# Altium schematic symbol library WR-TBL_Pluggable Connector.SchLib: 879 symbols (part 13 of 15)
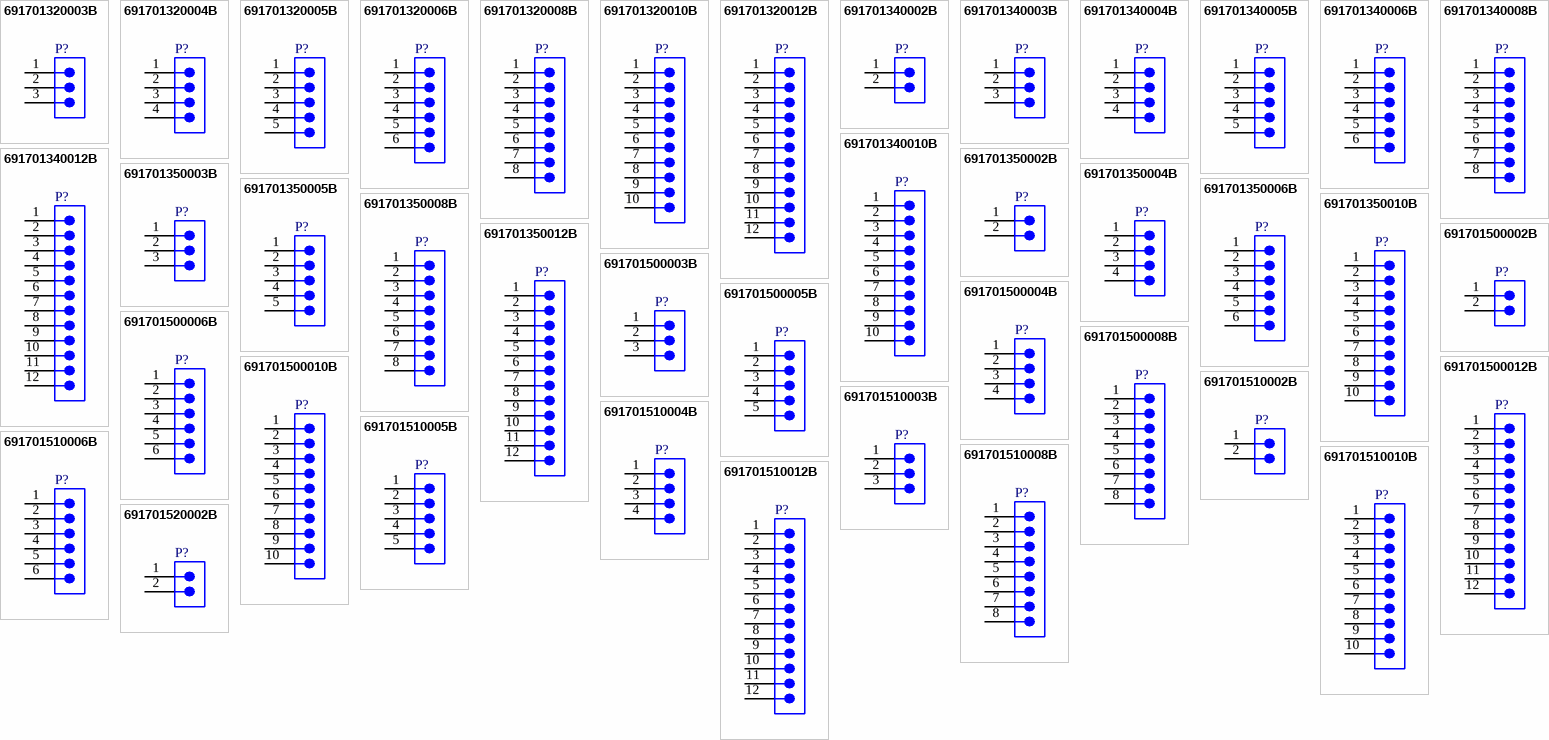
[diagram p33: symbols 691701320003B to 691701520002B]

## 691701500008B
designator P?  (value not drawn)
WR-TBL Series 7015B Open Vertical PCB Header, SMT, pitch 5.08mm, 08p; Manufacturer: Wurth Elektronik; Modularity: No; Rated Current: 10A; Working Voltage: 300V (AC); Manufacturer Part Number: 691701500008B; Product Series: WR-TBL; ComponentLink1Description: Website Link; ComponentLink1URL: https://www.we-online.com; ComponentLink2Description: Datasheet Link; ComponentLink2URL: https://www.we-online.com/components/products/datasheet/691701500008B; Mount: Surface Mount; Operating Temperature Min: -40degC; Operating Temperature Max: 130degC; Packaging: Box; Application: Pluggable; Number of Pins: 8; Number of Rows: 1; Orientation: Vertical; Lead Pitch: 5.08mm
footprint 691701500008B
pins: 1, 2, 3, 4, 5, 6, 7, 8

## 691701500010B
designator P?  (value not drawn)
WR-TBL Series 7015B Open Vertical PCB Header, SMT, pitch 5.08mm, 10p; Manufacturer: Wurth Elektronik; Modularity: No; Rated Current: 10A; Working Voltage: 300V (AC); Manufacturer Part Number: 691701500010B; Product Series: WR-TBL; ComponentLink1Description: Website Link; ComponentLink1URL: https://www.we-online.com; ComponentLink2Description: Datasheet Link; ComponentLink2URL: https://www.we-online.com/components/products/datasheet/691701500010B; Mount: Surface Mount; Operating Temperature Min: -40degC; Operating Temperature Max: 130degC; Packaging: Box; Application: Pluggable; Number of Pins: 10; Number of Rows: 1; Orientation: Vertical; Lead Pitch: 5.08mm
footprint 691701500010B
pins: 1, 2, 3, 4, 5, 6, 7, 8, 9, 10

## 691701500012B
designator P?  (value not drawn)
WR-TBL Series 7015B Open Vertical PCB Header, SMT, pitch 5.08mm, 12p; Manufacturer: Wurth Elektronik; Modularity: No; Rated Current: 10A; Working Voltage: 300V (AC); Manufacturer Part Number: 691701500012B; Product Series: WR-TBL; ComponentLink1Description: Website Link; ComponentLink1URL: https://www.we-online.com; ComponentLink2Description: Datasheet Link; ComponentLink2URL: https://www.we-online.com/components/products/datasheet/691701500012B; Mount: Surface Mount; Operating Temperature Min: -40degC; Operating Temperature Max: 130degC; Packaging: Box; Application: Pluggable; Number of Pins: 12; Number of Rows: 1; Orientation: Vertical; Lead Pitch: 5.08mm
footprint 691701500012B
pins: 1, 2, 3, 4, 5, 6, 7, 8, 9, 10, 11, 12

## 691701510002B
designator P?  (value not drawn)
WR-TBL Series 7015B Close Vertical PCB Header, SMT, pitch 5.08mm, 02p; Manufacturer: Wurth Elektronik; Modularity: No; Rated Current: 10A; Working Voltage: 300V (AC); Manufacturer Part Number: 691701510002B; Product Series: WR-TBL; ComponentLink1Description: Website Link; ComponentLink1URL: https://www.we-online.com; ComponentLink2Description: Datasheet Link; ComponentLink2URL: https://www.we-online.com/components/products/datasheet/691701510002B; Mount: Surface Mount; Operating Temperature Min: -40degC; Operating Temperature Max: 130degC; Packaging: Box; Application: Pluggable; Number of Pins: 2; Number of Rows: 1; Orientation: Vertical; Lead Pitch: 5.08mm
footprint 691701510002B
pins: 1, 2

## 691701510003B
designator P?  (value not drawn)
WR-TBL Series 7015B Close Vertical PCB Header, SMT, pitch 5.08mm, 03p; Manufacturer: Wurth Elektronik; Modularity: No; Rated Current: 10A; Working Voltage: 300V (AC); Manufacturer Part Number: 691701510003B; Product Series: WR-TBL; ComponentLink1Description: Website Link; ComponentLink1URL: https://www.we-online.com; ComponentLink2Description: Datasheet Link; ComponentLink2URL: https://www.we-online.com/components/products/datasheet/691701510003B; Mount: Surface Mount; Operating Temperature Min: -40degC; Operating Temperature Max: 130degC; Packaging: Box; Application: Pluggable; Number of Pins: 3; Number of Rows: 1; Orientation: Vertical; Lead Pitch: 5.08mm
footprint 691701510003B
pins: 1, 2, 3

## 691701510004B
designator P?  (value not drawn)
WR-TBL Series 7015B Close Vertical PCB Header, SMT, pitch 5.08mm, 04p; Manufacturer: Wurth Elektronik; Modularity: No; Rated Current: 10A; Working Voltage: 300V (AC); Manufacturer Part Number: 691701510004B; Product Series: WR-TBL; ComponentLink1Description: Website Link; ComponentLink1URL: https://www.we-online.com; ComponentLink2Description: Datasheet Link; ComponentLink2URL: https://www.we-online.com/components/products/datasheet/691701510004B; Mount: Surface Mount; Operating Temperature Min: -40degC; Operating Temperature Max: 130degC; Packaging: Box; Application: Pluggable; Number of Pins: 4; Number of Rows: 1; Orientation: Vertical; Lead Pitch: 5.08mm
footprint 691701510004B
pins: 1, 2, 3, 4

## 691701510005B
designator P?  (value not drawn)
WR-TBL Series 7015B Close Vertical PCB Header, SMT, pitch 5.08mm, 05p; Manufacturer: Wurth Elektronik; Modularity: No; Rated Current: 10A; Working Voltage: 300V (AC); Manufacturer Part Number: 691701510005B; Product Series: WR-TBL; ComponentLink1Description: Website Link; ComponentLink1URL: https://www.we-online.com; ComponentLink2Description: Datasheet Link; ComponentLink2URL: https://www.we-online.com/components/products/datasheet/691701510005B; Mount: Surface Mount; Operating Temperature Min: -40degC; Operating Temperature Max: 130degC; Packaging: Box; Application: Pluggable; Number of Pins: 5; Number of Rows: 1; Orientation: Vertical; Lead Pitch: 5.08mm
footprint 691701510005B
pins: 1, 2, 3, 4, 5

## 691701510006B
designator P?  (value not drawn)
WR-TBL Series 7015B Close Vertical PCB Header, SMT, pitch 5.08mm, 06p; Manufacturer: Wurth Elektronik; Modularity: No; Rated Current: 10A; Working Voltage: 300V (AC); Manufacturer Part Number: 691701510006B; Product Series: WR-TBL; ComponentLink1Description: Website Link; ComponentLink1URL: https://www.we-online.com; ComponentLink2Description: Datasheet Link; ComponentLink2URL: https://www.we-online.com/components/products/datasheet/691701510006B; Mount: Surface Mount; Operating Temperature Min: -40degC; Operating Temperature Max: 130degC; Packaging: Box; Application: Pluggable; Number of Pins: 6; Number of Rows: 1; Orientation: Vertical; Lead Pitch: 5.08mm
footprint 691701510006B
pins: 1, 2, 3, 4, 5, 6

## 691701510008B
designator P?  (value not drawn)
WR-TBL Series 7015B Close Vertical PCB Header, SMT, pitch 5.08mm, 08p; Manufacturer: Wurth Elektronik; Modularity: No; Rated Current: 10A; Working Voltage: 300V (AC); Manufacturer Part Number: 691701510008B; Product Series: WR-TBL; ComponentLink1Description: Website Link; ComponentLink1URL: https://www.we-online.com; ComponentLink2Description: Datasheet Link; ComponentLink2URL: https://www.we-online.com/components/products/datasheet/691701510008B; Mount: Surface Mount; Operating Temperature Min: -40degC; Operating Temperature Max: 130degC; Packaging: Box; Application: Pluggable; Number of Pins: 8; Number of Rows: 1; Orientation: Vertical; Lead Pitch: 5.08mm
footprint 691701510008B
pins: 1, 2, 3, 4, 5, 6, 7, 8

## 691701510010B
designator P?  (value not drawn)
WR-TBL Series 7015B Close Vertical PCB Header, SMT, pitch 5.08mm, 10p; Manufacturer: Wurth Elektronik; Modularity: No; Rated Current: 10A; Working Voltage: 300V (AC); Manufacturer Part Number: 691701510010B; Product Series: WR-TBL; ComponentLink1Description: Website Link; ComponentLink1URL: https://www.we-online.com; ComponentLink2Description: Datasheet Link; ComponentLink2URL: https://www.we-online.com/components/products/datasheet/691701510010B; Mount: Surface Mount; Operating Temperature Min: -40degC; Operating Temperature Max: 130degC; Packaging: Box; Application: Pluggable; Number of Pins: 10; Number of Rows: 1; Orientation: Vertical; Lead Pitch: 5.08mm
footprint 691701510010B
pins: 1, 2, 3, 4, 5, 6, 7, 8, 9, 10

## 691701510012B
designator P?  (value not drawn)
WR-TBL Series 7015B Close Vertical PCB Header, SMT, pitch 5.08mm, 12p; Manufacturer: Wurth Elektronik; Modularity: No; Rated Current: 10A; Working Voltage: 300V (AC); Manufacturer Part Number: 691701510012B; Product Series: WR-TBL; ComponentLink1Description: Website Link; ComponentLink1URL: https://www.we-online.com; ComponentLink2Description: Datasheet Link; ComponentLink2URL: https://www.we-online.com/components/products/datasheet/691701510012B; Mount: Surface Mount; Operating Temperature Min: -40degC; Operating Temperature Max: 130degC; Packaging: Box; Application: Pluggable; Number of Pins: 12; Number of Rows: 1; Orientation: Vertical; Lead Pitch: 5.08mm
footprint 691701510012B
pins: 1, 2, 3, 4, 5, 6, 7, 8, 9, 10, 11, 12

## 691701520002B
designator P?  (value not drawn)
WR-TBL Series 7015B Close Vertical PCB Header with Flanges, SMT, pitch 5.08mm, 02p; Manufacturer: Wurth Elektronik; Modularity: No; Rated Current: 10A; Working Voltage: 300V (AC); Manufacturer Part Number: 691701520002B; Product Series: WR-TBL; ComponentLink1Description: Website Link; ComponentLink1URL: https://www.we-online.com; ComponentLink2Description: Datasheet Link; ComponentLink2URL: https://www.we-online.com/components/products/datasheet/691701520002B; Mount: Surface Mount; Operating Temperature Min: -40degC; Operating Temperature Max: 130degC; Packaging: Box; Application: Pluggable; Number of Pins: 2; Number of Rows: 1; Orientation: Vertical; Lead Pitch: 5.08mm
footprint 691701520002B
pins: 1, 2

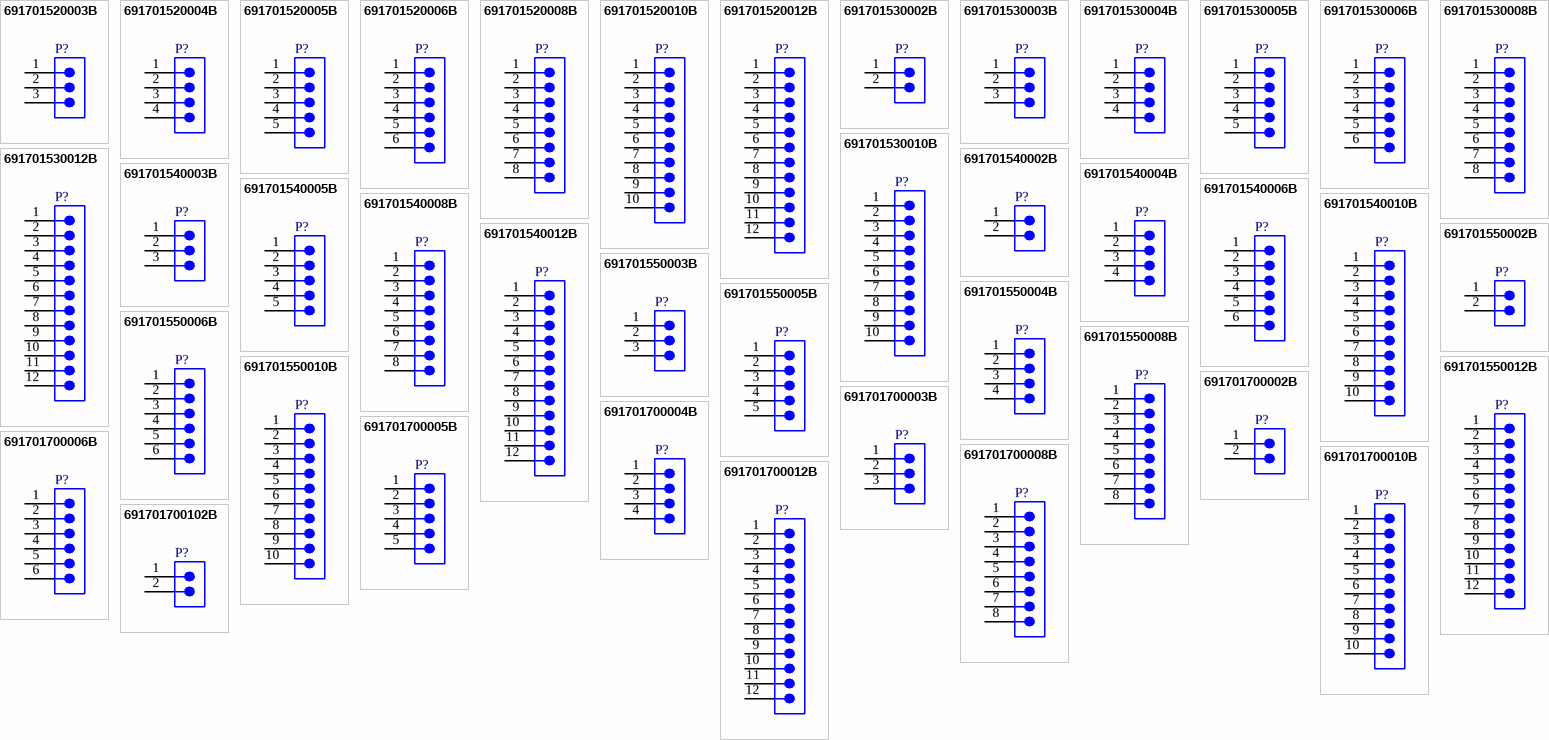
[diagram p19: symbols 691701520003B to 691701700102B]

## 691701520003B
designator P?  (value not drawn)
WR-TBL Series 7015B Close Vertical PCB Header with Flanges, SMT, pitch 5.08mm, 03p; Manufacturer: Wurth Elektronik; Modularity: No; Rated Current: 10A; Working Voltage: 300V (AC); Manufacturer Part Number: 691701520003B; Product Series: WR-TBL; ComponentLink1Description: Website Link; ComponentLink1URL: https://www.we-online.com; ComponentLink2Description: Datasheet Link; ComponentLink2URL: https://www.we-online.com/components/products/datasheet/691701520003B; Mount: Surface Mount; Operating Temperature Min: -40degC; Operating Temperature Max: 130degC; Packaging: Box; Application: Pluggable; Number of Pins: 3; Number of Rows: 1; Orientation: Vertical; Lead Pitch: 5.08mm
footprint 691701520003B
pins: 1, 2, 3

## 691701520004B
designator P?  (value not drawn)
WR-TBL Series 7015B Close Vertical PCB Header with Flanges, SMT, pitch 5.08mm, 04p; Manufacturer: Wurth Elektronik; Modularity: No; Rated Current: 10A; Working Voltage: 300V (AC); Manufacturer Part Number: 691701520004B; Product Series: WR-TBL; ComponentLink1Description: Website Link; ComponentLink1URL: https://www.we-online.com; ComponentLink2Description: Datasheet Link; ComponentLink2URL: https://www.we-online.com/components/products/datasheet/691701520004B; Mount: Surface Mount; Operating Temperature Min: -40degC; Operating Temperature Max: 130degC; Packaging: Box; Application: Pluggable; Number of Pins: 4; Number of Rows: 1; Orientation: Vertical; Lead Pitch: 5.08mm
footprint 691701520004B
pins: 1, 2, 3, 4

## 691701520005B
designator P?  (value not drawn)
WR-TBL Series 7015B Close Vertical PCB Header with Flanges, SMT, pitch 5.08mm, 05p; Manufacturer: Wurth Elektronik; Modularity: No; Rated Current: 10A; Working Voltage: 300V (AC); Manufacturer Part Number: 691701520005B; Product Series: WR-TBL; ComponentLink1Description: Website Link; ComponentLink1URL: https://www.we-online.com; ComponentLink2Description: Datasheet Link; ComponentLink2URL: https://www.we-online.com/components/products/datasheet/691701520005B; Mount: Surface Mount; Operating Temperature Min: -40degC; Operating Temperature Max: 130degC; Packaging: Box; Application: Pluggable; Number of Pins: 5; Number of Rows: 1; Orientation: Vertical; Lead Pitch: 5.08mm
footprint 691701520005B
pins: 1, 2, 3, 4, 5

## 691701520006B
designator P?  (value not drawn)
WR-TBL Series 7015B Close Vertical PCB Header with Flanges, SMT, pitch 5.08mm, 06p; Manufacturer: Wurth Elektronik; Modularity: No; Rated Current: 10A; Working Voltage: 300V (AC); Manufacturer Part Number: 691701520006B; Product Series: WR-TBL; ComponentLink1Description: Website Link; ComponentLink1URL: https://www.we-online.com; ComponentLink2Description: Datasheet Link; ComponentLink2URL: https://www.we-online.com/components/products/datasheet/691701520006B; Mount: Surface Mount; Operating Temperature Min: -40degC; Operating Temperature Max: 130degC; Packaging: Box; Application: Pluggable; Number of Pins: 6; Number of Rows: 1; Orientation: Vertical; Lead Pitch: 5.08mm
footprint 691701520006B
pins: 1, 2, 3, 4, 5, 6

## 691701520008B
designator P?  (value not drawn)
WR-TBL Series 7015B Close Vertical PCB Header with Flanges, SMT, pitch 5.08mm, 08p; Manufacturer: Wurth Elektronik; Modularity: No; Rated Current: 10A; Working Voltage: 300V (AC); Manufacturer Part Number: 691701520008B; Product Series: WR-TBL; ComponentLink1Description: Website Link; ComponentLink1URL: https://www.we-online.com; ComponentLink2Description: Datasheet Link; ComponentLink2URL: https://www.we-online.com/components/products/datasheet/691701520008B; Mount: Surface Mount; Operating Temperature Min: -40degC; Operating Temperature Max: 130degC; Packaging: Box; Application: Pluggable; Number of Pins: 8; Number of Rows: 1; Orientation: Vertical; Lead Pitch: 5.08mm
footprint 691701520008B
pins: 1, 2, 3, 4, 5, 6, 7, 8

## 691701520010B
designator P?  (value not drawn)
WR-TBL Series 7015B Close Vertical PCB Header with Flanges, SMT, pitch 5.08mm, 10p; Manufacturer: Wurth Elektronik; Modularity: No; Rated Current: 10A; Working Voltage: 300V (AC); Manufacturer Part Number: 691701520010B; Product Series: WR-TBL; ComponentLink1Description: Website Link; ComponentLink1URL: https://www.we-online.com; ComponentLink2Description: Datasheet Link; ComponentLink2URL: https://www.we-online.com/components/products/datasheet/691701520010B; Mount: Surface Mount; Operating Temperature Min: -40degC; Operating Temperature Max: 130degC; Packaging: Box; Application: Pluggable; Number of Pins: 10; Number of Rows: 1; Orientation: Vertical; Lead Pitch: 5.08mm
footprint 691701520010B
pins: 1, 2, 3, 4, 5, 6, 7, 8, 9, 10

## 691701520012B
designator P?  (value not drawn)
WR-TBL Series 7015B Close Vertical PCB Header with Flanges, SMT, pitch 5.08mm, 12p; Manufacturer: Wurth Elektronik; Modularity: No; Rated Current: 10A; Working Voltage: 300V (AC); Manufacturer Part Number: 691701520012B; Product Series: WR-TBL; ComponentLink1Description: Website Link; ComponentLink1URL: https://www.we-online.com; ComponentLink2Description: Datasheet Link; ComponentLink2URL: https://www.we-online.com/components/products/datasheet/691701520012B; Mount: Surface Mount; Operating Temperature Min: -40degC; Operating Temperature Max: 130degC; Packaging: Box; Application: Pluggable; Number of Pins: 12; Number of Rows: 1; Orientation: Vertical; Lead Pitch: 5.08mm
footprint 691701520012B
pins: 1, 2, 3, 4, 5, 6, 7, 8, 9, 10, 11, 12

## 691701530002B
designator P?  (value not drawn)
WR-TBL Series 7015B Open Horizontal PCB Header, SMT, pitch 5.08mm, 02p; Manufacturer: Wurth Elektronik; Modularity: No; Rated Current: 10A; Working Voltage: 300V (AC); Manufacturer Part Number: 691701530002B; Product Series: WR-TBL; ComponentLink1Description: Website Link; ComponentLink1URL: https://www.we-online.com; ComponentLink2Description: Datasheet Link; ComponentLink2URL: https://www.we-online.com/components/products/datasheet/691701530002B; Mount: Surface Mount; Operating Temperature Min: -40degC; Operating Temperature Max: 130degC; Packaging: Box; Application: Pluggable; Number of Pins: 2; Number of Rows: 1; Orientation: Horizontal; Lead Pitch: 5.08mm
footprint 691701530002B
pins: 1, 2

## 691701530003B
designator P?  (value not drawn)
WR-TBL Series 7015B Open Horizontal PCB Header, SMT, pitch 5.08mm, 03p; Manufacturer: Wurth Elektronik; Modularity: No; Rated Current: 10A; Working Voltage: 300V (AC); Manufacturer Part Number: 691701530003B; Product Series: WR-TBL; ComponentLink1Description: Website Link; ComponentLink1URL: https://www.we-online.com; ComponentLink2Description: Datasheet Link; ComponentLink2URL: https://www.we-online.com/components/products/datasheet/691701530003B; Mount: Surface Mount; Operating Temperature Min: -40degC; Operating Temperature Max: 130degC; Packaging: Box; Application: Pluggable; Number of Pins: 3; Number of Rows: 1; Orientation: Horizontal; Lead Pitch: 5.08mm
footprint 691701530003B
pins: 1, 2, 3

## 691701530004B
designator P?  (value not drawn)
WR-TBL Series 7015B Open Horizontal PCB Header, SMT, pitch 5.08mm, 04p; Manufacturer: Wurth Elektronik; Modularity: No; Rated Current: 10A; Working Voltage: 300V (AC); Manufacturer Part Number: 691701530004B; Product Series: WR-TBL; ComponentLink1Description: Website Link; ComponentLink1URL: https://www.we-online.com; ComponentLink2Description: Datasheet Link; ComponentLink2URL: https://www.we-online.com/components/products/datasheet/691701530004B; Mount: Surface Mount; Operating Temperature Min: -40degC; Operating Temperature Max: 130degC; Packaging: Box; Application: Pluggable; Number of Pins: 4; Number of Rows: 1; Orientation: Horizontal; Lead Pitch: 5.08mm
footprint 691701530004B
pins: 1, 2, 3, 4

## 691701530005B
designator P?  (value not drawn)
WR-TBL Series 7015B Open Horizontal PCB Header, SMT, pitch 5.08mm, 05p; Manufacturer: Wurth Elektronik; Modularity: No; Rated Current: 10A; Working Voltage: 300V (AC); Manufacturer Part Number: 691701530005B; Product Series: WR-TBL; ComponentLink1Description: Website Link; ComponentLink1URL: https://www.we-online.com; ComponentLink2Description: Datasheet Link; ComponentLink2URL: https://www.we-online.com/components/products/datasheet/691701530005B; Mount: Surface Mount; Operating Temperature Min: -40degC; Operating Temperature Max: 130degC; Packaging: Box; Application: Pluggable; Number of Pins: 5; Number of Rows: 1; Orientation: Horizontal; Lead Pitch: 5.08mm
footprint 691701530005B
pins: 1, 2, 3, 4, 5

## 691701530006B
designator P?  (value not drawn)
WR-TBL Series 7015B Open Horizontal PCB Header, SMT, pitch 5.08mm, 06p; Manufacturer: Wurth Elektronik; Modularity: No; Rated Current: 10A; Working Voltage: 300V (AC); Manufacturer Part Number: 691701530006B; Product Series: WR-TBL; ComponentLink1Description: Website Link; ComponentLink1URL: https://www.we-online.com; ComponentLink2Description: Datasheet Link; ComponentLink2URL: https://www.we-online.com/components/products/datasheet/691701530006B; Mount: Surface Mount; Operating Temperature Min: -40degC; Operating Temperature Max: 130degC; Packaging: Box; Application: Pluggable; Number of Pins: 6; Number of Rows: 1; Orientation: Horizontal; Lead Pitch: 5.08mm
footprint 691701530006B
pins: 1, 2, 3, 4, 5, 6

## 691701530008B
designator P?  (value not drawn)
WR-TBL Series 7015B Open Horizontal PCB Header, SMT, pitch 5.08mm, 08p; Manufacturer: Wurth Elektronik; Modularity: No; Rated Current: 10A; Working Voltage: 300V (AC); Manufacturer Part Number: 691701530008B; Product Series: WR-TBL; ComponentLink1Description: Website Link; ComponentLink1URL: https://www.we-online.com; ComponentLink2Description: Datasheet Link; ComponentLink2URL: https://www.we-online.com/components/products/datasheet/691701530008B; Mount: Surface Mount; Operating Temperature Min: -40degC; Operating Temperature Max: 130degC; Packaging: Box; Application: Pluggable; Number of Pins: 8; Number of Rows: 1; Orientation: Horizontal; Lead Pitch: 5.08mm
footprint 691701530008B
pins: 1, 2, 3, 4, 5, 6, 7, 8

## 691701530010B
designator P?  (value not drawn)
WR-TBL Series 7015B Open Horizontal PCB Header, SMT, pitch 5.08mm, 10p; Manufacturer: Wurth Elektronik; Modularity: No; Rated Current: 10A; Working Voltage: 300V (AC); Manufacturer Part Number: 691701530010B; Product Series: WR-TBL; ComponentLink1Description: Website Link; ComponentLink1URL: https://www.we-online.com; ComponentLink2Description: Datasheet Link; ComponentLink2URL: https://www.we-online.com/components/products/datasheet/691701530010B; Mount: Surface Mount; Operating Temperature Min: -40degC; Operating Temperature Max: 130degC; Packaging: Box; Application: Pluggable; Number of Pins: 10; Number of Rows: 1; Orientation: Horizontal; Lead Pitch: 5.08mm
footprint 691701530010B
pins: 1, 2, 3, 4, 5, 6, 7, 8, 9, 10

## 691701530012B
designator P?  (value not drawn)
WR-TBL Series 7015B Open Horizontal PCB Header, SMT, pitch 5.08mm, 12p; Manufacturer: Wurth Elektronik; Modularity: No; Rated Current: 10A; Working Voltage: 300V (AC); Manufacturer Part Number: 691701530012B; Product Series: WR-TBL; ComponentLink1Description: Website Link; ComponentLink1URL: https://www.we-online.com; ComponentLink2Description: Datasheet Link; ComponentLink2URL: https://www.we-online.com/components/products/datasheet/691701530012B; Mount: Surface Mount; Operating Temperature Min: -40degC; Operating Temperature Max: 130degC; Packaging: Box; Application: Pluggable; Number of Pins: 12; Number of Rows: 1; Orientation: Horizontal; Lead Pitch: 5.08mm
footprint 691701530012B
pins: 1, 2, 3, 4, 5, 6, 7, 8, 9, 10, 11, 12

## 691701540002B
designator P?  (value not drawn)
WR-TBL Series 7015B Close Horizontal PCB Header, SMT, pitch 5.08mm, 02p; Manufacturer: Wurth Elektronik; Modularity: No; Rated Current: 15A; Working Voltage: 300V (AC); Manufacturer Part Number: 691701540002B; Product Series: WR-TBL; ComponentLink1Description: Website Link; ComponentLink1URL: https://www.we-online.com; ComponentLink2Description: Datasheet Link; ComponentLink2URL: https://www.we-online.com/components/products/datasheet/691701540002B; Mount: Surface Mount; Operating Temperature Min: -40degC; Operating Temperature Max: 130degC; Packaging: Box; Application: Pluggable; Number of Pins: 2; Number of Rows: 1; Orientation: Horizontal; Lead Pitch: 5.08mm
footprint 691701540002B
pins: 1, 2

## 691701540003B
designator P?  (value not drawn)
WR-TBL Series 7015B Close Horizontal PCB Header, SMT, pitch 5.08mm, 03p; Manufacturer: Wurth Elektronik; Modularity: No; Rated Current: 15A; Working Voltage: 300V (AC); Manufacturer Part Number: 691701540003B; Product Series: WR-TBL; ComponentLink1Description: Website Link; ComponentLink1URL: https://www.we-online.com; ComponentLink2Description: Datasheet Link; ComponentLink2URL: https://www.we-online.com/components/products/datasheet/691701540003B; Mount: Surface Mount; Operating Temperature Min: -40degC; Operating Temperature Max: 130degC; Packaging: Box; Application: Pluggable; Number of Pins: 3; Number of Rows: 1; Orientation: Horizontal; Lead Pitch: 5.08mm
footprint 691701540003B
pins: 1, 2, 3

## 691701540004B
designator P?  (value not drawn)
WR-TBL Series 7015B Close Horizontal PCB Header, SMT, pitch 5.08mm, 04p; Manufacturer: Wurth Elektronik; Modularity: No; Rated Current: 15A; Working Voltage: 300V (AC); Manufacturer Part Number: 691701540004B; Product Series: WR-TBL; ComponentLink1Description: Website Link; ComponentLink1URL: https://www.we-online.com; ComponentLink2Description: Datasheet Link; ComponentLink2URL: https://www.we-online.com/components/products/datasheet/691701540004B; Mount: Surface Mount; Operating Temperature Min: -40degC; Operating Temperature Max: 130degC; Packaging: Box; Application: Pluggable; Number of Pins: 4; Number of Rows: 1; Orientation: Horizontal; Lead Pitch: 5.08mm
footprint 691701540004B
pins: 1, 2, 3, 4

## 691701540005B
designator P?  (value not drawn)
WR-TBL Series 7015B Close Horizontal PCB Header, SMT, pitch 5.08mm, 05p; Manufacturer: Wurth Elektronik; Modularity: No; Rated Current: 15A; Working Voltage: 300V (AC); Manufacturer Part Number: 691701540005B; Product Series: WR-TBL; ComponentLink1Description: Website Link; ComponentLink1URL: https://www.we-online.com; ComponentLink2Description: Datasheet Link; ComponentLink2URL: https://www.we-online.com/components/products/datasheet/691701540005B; Mount: Surface Mount; Operating Temperature Min: -40degC; Operating Temperature Max: 130degC; Packaging: Box; Application: Pluggable; Number of Pins: 5; Number of Rows: 1; Orientation: Horizontal; Lead Pitch: 5.08mm
footprint 691701540005B
pins: 1, 2, 3, 4, 5

## 691701540006B
designator P?  (value not drawn)
WR-TBL Series 7015B Close Horizontal PCB Header, SMT, pitch 5.08mm, 06p; Manufacturer: Wurth Elektronik; Modularity: No; Rated Current: 15A; Working Voltage: 300V (AC); Manufacturer Part Number: 691701540006B; Product Series: WR-TBL; ComponentLink1Description: Website Link; ComponentLink1URL: https://www.we-online.com; ComponentLink2Description: Datasheet Link; ComponentLink2URL: https://www.we-online.com/components/products/datasheet/691701540006B; Mount: Surface Mount; Operating Temperature Min: -40degC; Operating Temperature Max: 130degC; Packaging: Box; Application: Pluggable; Number of Pins: 6; Number of Rows: 1; Orientation: Horizontal; Lead Pitch: 5.08mm
footprint 691701540006B
pins: 1, 2, 3, 4, 5, 6

## 691701540008B
designator P?  (value not drawn)
WR-TBL Series 7015B Close Horizontal PCB Header, SMT, pitch 5.08mm, 08p; Manufacturer: Wurth Elektronik; Modularity: No; Rated Current: 15A; Working Voltage: 300V (AC); Manufacturer Part Number: 691701540008B; Product Series: WR-TBL; ComponentLink1Description: Website Link; ComponentLink1URL: https://www.we-online.com; ComponentLink2Description: Datasheet Link; ComponentLink2URL: https://www.we-online.com/components/products/datasheet/691701540008B; Mount: Surface Mount; Operating Temperature Min: -40degC; Operating Temperature Max: 130degC; Packaging: Box; Application: Pluggable; Number of Pins: 8; Number of Rows: 1; Orientation: Horizontal; Lead Pitch: 5.08mm
footprint 691701540008B
pins: 1, 2, 3, 4, 5, 6, 7, 8

## 691701540010B
designator P?  (value not drawn)
WR-TBL Series 7015B Close Horizontal PCB Header, SMT, pitch 5.08mm, 10p; Manufacturer: Wurth Elektronik; Modularity: No; Rated Current: 15A; Working Voltage: 300V (AC); Manufacturer Part Number: 691701540010B; Product Series: WR-TBL; ComponentLink1Description: Website Link; ComponentLink1URL: https://www.we-online.com; ComponentLink2Description: Datasheet Link; ComponentLink2URL: https://www.we-online.com/components/products/datasheet/691701540010B; Mount: Surface Mount; Operating Temperature Min: -40degC; Operating Temperature Max: 130degC; Packaging: Box; Application: Pluggable; Number of Pins: 10; Number of Rows: 1; Orientation: Horizontal; Lead Pitch: 5.08mm
footprint 691701540010B
pins: 1, 2, 3, 4, 5, 6, 7, 8, 9, 10

## 691701540012B
designator P?  (value not drawn)
WR-TBL Series 7015B Close Horizontal PCB Header, SMT, pitch 5.08mm, 12p; Manufacturer: Wurth Elektronik; Modularity: No; Rated Current: 15A; Working Voltage: 300V (AC); Manufacturer Part Number: 691701540012B; Product Series: WR-TBL; ComponentLink1Description: Website Link; ComponentLink1URL: https://www.we-online.com; ComponentLink2Description: Datasheet Link; ComponentLink2URL: https://www.we-online.com/components/products/datasheet/691701540012B; Mount: Surface Mount; Operating Temperature Min: -40degC; Operating Temperature Max: 130degC; Packaging: Box; Application: Pluggable; Number of Pins: 12; Number of Rows: 1; Orientation: Horizontal; Lead Pitch: 5.08mm
footprint 691701540012B
pins: 1, 2, 3, 4, 5, 6, 7, 8, 9, 10, 11, 12

## 691701550002B
designator P?  (value not drawn)
WR-TBL Series 7015B Closed Horizontal PCB Header with Flanges, SMT, pitch 5.08mm, 02p; Manufacturer: Wurth Elektronik; Modularity: No; Rated Current: 15A; Working Voltage: 300V (AC); Manufacturer Part Number: 691701550002B; Product Series: WR-TBL; ComponentLink1Description: Website Link; ComponentLink1URL: https://www.we-online.com; ComponentLink2Description: Datasheet Link; ComponentLink2URL: https://www.we-online.com/components/products/datasheet/691701550002B; Mount: Surface Mount; Operating Temperature Min: -40degC; Operating Temperature Max: 130degC; Packaging: Box; Application: Pluggable; Number of Pins: 2; Number of Rows: 1; Orientation: Horizontal; Lead Pitch: 5.08mm
footprint 691701550002B
pins: 1, 2

## 691701550003B
designator P?  (value not drawn)
WR-TBL Series 7015B Closed Horizontal PCB Header with Flanges, SMT, pitch 5.08mm, 03p; Manufacturer: Wurth Elektronik; Modularity: No; Rated Current: 15A; Working Voltage: 300V (AC); Manufacturer Part Number: 691701550003B; Product Series: WR-TBL; ComponentLink1Description: Website Link; ComponentLink1URL: https://www.we-online.com; ComponentLink2Description: Datasheet Link; ComponentLink2URL: https://www.we-online.com/components/products/datasheet/691701550003B; Mount: Surface Mount; Operating Temperature Min: -40degC; Operating Temperature Max: 130degC; Packaging: Box; Application: Pluggable; Number of Pins: 3; Number of Rows: 1; Orientation: Horizontal; Lead Pitch: 5.08mm
footprint 691701550003B
pins: 1, 2, 3

## 691701550004B
designator P?  (value not drawn)
WR-TBL Series 7015B Closed Horizontal PCB Header with Flanges, SMT, pitch 5.08mm, 04p; Manufacturer: Wurth Elektronik; Modularity: No; Rated Current: 15A; Working Voltage: 300V (AC); Manufacturer Part Number: 691701550004B; Product Series: WR-TBL; ComponentLink1Description: Website Link; ComponentLink1URL: https://www.we-online.com; ComponentLink2Description: Datasheet Link; ComponentLink2URL: https://www.we-online.com/components/products/datasheet/691701550004B; Mount: Surface Mount; Operating Temperature Min: -40degC; Operating Temperature Max: 130degC; Packaging: Box; Application: Pluggable; Number of Pins: 4; Number of Rows: 1; Orientation: Horizontal; Lead Pitch: 5.08mm
footprint 691701550004B
pins: 1, 2, 3, 4

## 691701550005B
designator P?  (value not drawn)
WR-TBL Series 7015B Closed Horizontal PCB Header with Flanges, SMT, pitch 5.08mm, 05p; Manufacturer: Wurth Elektronik; Modularity: No; Rated Current: 15A; Working Voltage: 300V (AC); Manufacturer Part Number: 691701550005B; Product Series: WR-TBL; ComponentLink1Description: Website Link; ComponentLink1URL: https://www.we-online.com; ComponentLink2Description: Datasheet Link; ComponentLink2URL: https://www.we-online.com/components/products/datasheet/691701550005B; Mount: Surface Mount; Operating Temperature Min: -40degC; Operating Temperature Max: 130degC; Packaging: Box; Application: Pluggable; Number of Pins: 5; Number of Rows: 1; Orientation: Horizontal; Lead Pitch: 5.08mm
footprint 691701550005B
pins: 1, 2, 3, 4, 5

## 691701550006B
designator P?  (value not drawn)
WR-TBL Series 7015B Closed Horizontal PCB Header with Flanges, SMT, pitch 5.08mm, 06p; Manufacturer: Wurth Elektronik; Modularity: No; Rated Current: 15A; Working Voltage: 300V (AC); Manufacturer Part Number: 691701550006B; Product Series: WR-TBL; ComponentLink1Description: Website Link; ComponentLink1URL: https://www.we-online.com; ComponentLink2Description: Datasheet Link; ComponentLink2URL: https://www.we-online.com/components/products/datasheet/691701550006B; Mount: Surface Mount; Operating Temperature Min: -40degC; Operating Temperature Max: 130degC; Packaging: Box; Application: Pluggable; Number of Pins: 6; Number of Rows: 1; Orientation: Horizontal; Lead Pitch: 5.08mm
footprint 691701550006B
pins: 1, 2, 3, 4, 5, 6

## 691701550008B
designator P?  (value not drawn)
WR-TBL Series 7015B Closed Horizontal PCB Header with Flanges, SMT, pitch 5.08mm, 08p; Manufacturer: Wurth Elektronik; Modularity: No; Rated Current: 15A; Working Voltage: 300V (AC); Manufacturer Part Number: 691701550008B; Product Series: WR-TBL; ComponentLink1Description: Website Link; ComponentLink1URL: https://www.we-online.com; ComponentLink2Description: Datasheet Link; ComponentLink2URL: https://www.we-online.com/components/products/datasheet/691701550008B; Mount: Surface Mount; Operating Temperature Min: -40degC; Operating Temperature Max: 130degC; Packaging: Box; Application: Pluggable; Number of Pins: 8; Number of Rows: 1; Orientation: Horizontal; Lead Pitch: 5.08mm
footprint 691701550008B
pins: 1, 2, 3, 4, 5, 6, 7, 8

## 691701550010B
designator P?  (value not drawn)
WR-TBL Series 7015B Closed Horizontal PCB Header with Flanges, SMT, pitch 5.08mm, 10p; Manufacturer: Wurth Elektronik; Modularity: No; Rated Current: 15A; Working Voltage: 300V (AC); Manufacturer Part Number: 691701550010B; Product Series: WR-TBL; ComponentLink1Description: Website Link; ComponentLink1URL: https://www.we-online.com; ComponentLink2Description: Datasheet Link; ComponentLink2URL: https://www.we-online.com/components/products/datasheet/691701550010B; Mount: Surface Mount; Operating Temperature Min: -40degC; Operating Temperature Max: 130degC; Packaging: Box; Application: Pluggable; Number of Pins: 10; Number of Rows: 1; Orientation: Horizontal; Lead Pitch: 5.08mm
footprint 691701550010B
pins: 1, 2, 3, 4, 5, 6, 7, 8, 9, 10

## 691701550012B
designator P?  (value not drawn)
WR-TBL Series 7015B Closed Horizontal PCB Header with Flanges, SMT, pitch 5.08mm, 12p; Manufacturer: Wurth Elektronik; Modularity: No; Rated Current: 15A; Working Voltage: 300V (AC); Manufacturer Part Number: 691701550012B; Product Series: WR-TBL; ComponentLink1Description: Website Link; ComponentLink1URL: https://www.we-online.com; ComponentLink2Description: Datasheet Link; ComponentLink2URL: https://www.we-online.com/components/products/datasheet/691701550012B; Mount: Surface Mount; Operating Temperature Min: -40degC; Operating Temperature Max: 130degC; Packaging: Box; Application: Pluggable; Number of Pins: 12; Number of Rows: 1; Orientation: Horizontal; Lead Pitch: 5.08mm
footprint 691701550012B
pins: 1, 2, 3, 4, 5, 6, 7, 8, 9, 10, 11, 12

## 691701700002B
designator P?  (value not drawn)
WR-TBL Series 7017B Open Vertical PCB Header, THR, pitch 5mm, 02p; Manufacturer: Wurth Elektronik; Insulator Material: LCP; Rated Current (cULus): 15A; Working Voltage (cULus): 300V (AC); Withstanding Voltage (cULus): 1600V (AC); Manufacturer Part Number: 691701700002B; Product Series: WR-TBL; ComponentLink1Description: Website Link; ComponentLink1URL: https://www.we-online.com; ComponentLink2Description: Datasheet Link; ComponentLink2URL: https://www.we-online.com/components/products/datasheet/691701700002B; Mount: Through Hole Reflow; Operating Temperature Min: -40degC; Operating Temperature Max: 130degC; Packaging: Tape and Reel; Application: Pluggable; Number of Pins: 2; Number of Rows: 1; Orientation: Vertical; Lead Pitch: 5mm
footprint 691701700002B
pins: 1, 2

## 691701700003B
designator P?  (value not drawn)
WR-TBL Series 7017B Open Vertical PCB Header, THR, pitch 5mm, 03p; Manufacturer: Wurth Elektronik; Insulator Material: LCP; Rated Current (cULus): 15A; Working Voltage (cULus): 300V (AC); Withstanding Voltage (cULus): 1600V (AC); Manufacturer Part Number: 691701700003B; Product Series: WR-TBL; ComponentLink1Description: Website Link; ComponentLink1URL: https://www.we-online.com; ComponentLink2Description: Datasheet Link; ComponentLink2URL: https://www.we-online.com/components/products/datasheet/691701700003B; Mount: Through Hole Reflow; Operating Temperature Min: -40degC; Operating Temperature Max: 130degC; Packaging: Tape and Reel; Application: Pluggable; Number of Pins: 3; Number of Rows: 1; Orientation: Vertical; Lead Pitch: 5mm
footprint 691701700003B
pins: 1, 2, 3

## 691701700004B
designator P?  (value not drawn)
WR-TBL Series 7017B Open Vertical PCB Header, THR, pitch 5mm, 04p; Manufacturer: Wurth Elektronik; Insulator Material: LCP; Rated Current (cULus): 15A; Working Voltage (cULus): 300V (AC); Withstanding Voltage (cULus): 1600V (AC); Manufacturer Part Number: 691701700004B; Product Series: WR-TBL; ComponentLink1Description: Website Link; ComponentLink1URL: https://www.we-online.com; ComponentLink2Description: Datasheet Link; ComponentLink2URL: https://www.we-online.com/components/products/datasheet/691701700004B; Mount: Through Hole Reflow; Operating Temperature Min: -40degC; Operating Temperature Max: 130degC; Packaging: Tape and Reel; Application: Pluggable; Number of Pins: 4; Number of Rows: 1; Orientation: Vertical; Lead Pitch: 5mm
footprint 691701700004B
pins: 1, 2, 3, 4

## 691701700005B
designator P?  (value not drawn)
WR-TBL Series 7017B Open Vertical PCB Header, THR, pitch 5mm, 05p; Manufacturer: Wurth Elektronik; Insulator Material: LCP; Rated Current (cULus): 15A; Working Voltage (cULus): 300V (AC); Withstanding Voltage (cULus): 1600V (AC); Manufacturer Part Number: 691701700005B; Product Series: WR-TBL; ComponentLink1Description: Website Link; ComponentLink1URL: https://www.we-online.com; ComponentLink2Description: Datasheet Link; ComponentLink2URL: https://www.we-online.com/components/products/datasheet/691701700005B; Mount: Through Hole Reflow; Operating Temperature Min: -40degC; Operating Temperature Max: 130degC; Packaging: Tape and Reel; Application: Pluggable; Number of Pins: 5; Number of Rows: 1; Orientation: Vertical; Lead Pitch: 5mm
footprint 691701700005B
pins: 1, 2, 3, 4, 5

## 691701700006B
designator P?  (value not drawn)
WR-TBL Series 7017B Open Vertical PCB Header, THR, pitch 5mm, 06p; Manufacturer: Wurth Elektronik; Insulator Material: LCP; Rated Current (cULus): 15A; Working Voltage (cULus): 300V (AC); Withstanding Voltage (cULus): 1600V (AC); Manufacturer Part Number: 691701700006B; Product Series: WR-TBL; ComponentLink1Description: Website Link; ComponentLink1URL: https://www.we-online.com; ComponentLink2Description: Datasheet Link; ComponentLink2URL: https://www.we-online.com/components/products/datasheet/691701700006B; Mount: Through Hole Reflow; Operating Temperature Min: -40degC; Operating Temperature Max: 130degC; Packaging: Tape and Reel; Application: Pluggable; Number of Pins: 6; Number of Rows: 1; Orientation: Vertical; Lead Pitch: 5mm
footprint 691701700006B
pins: 1, 2, 3, 4, 5, 6

## 691701700008B
designator P?  (value not drawn)
WR-TBL Series 7017B Open Vertical PCB Header, THR, pitch 5mm, 08p; Manufacturer: Wurth Elektronik; Insulator Material: LCP; Rated Current (cULus): 15A; Working Voltage (cULus): 300V (AC); Withstanding Voltage (cULus): 1600V (AC); Manufacturer Part Number: 691701700008B; Product Series: WR-TBL; ComponentLink1Description: Website Link; ComponentLink1URL: https://www.we-online.com; ComponentLink2Description: Datasheet Link; ComponentLink2URL: https://www.we-online.com/components/products/datasheet/691701700008B; Mount: Through Hole Reflow; Operating Temperature Min: -40degC; Operating Temperature Max: 130degC; Packaging: Tape and Reel; Application: Pluggable; Number of Pins: 8; Number of Rows: 1; Orientation: Vertical; Lead Pitch: 5mm
footprint 691701700008B
pins: 1, 2, 3, 4, 5, 6, 7, 8

## 691701700010B
designator P?  (value not drawn)
WR-TBL Series 7017B Open Vertical PCB Header, THR, pitch 5mm, 10p; Manufacturer: Wurth Elektronik; Insulator Material: LCP; Rated Current (cULus): 15A; Working Voltage (cULus): 300V (AC); Withstanding Voltage (cULus): 1600V (AC); Manufacturer Part Number: 691701700010B; Product Series: WR-TBL; ComponentLink1Description: Website Link; ComponentLink1URL: https://www.we-online.com; ComponentLink2Description: Datasheet Link; ComponentLink2URL: https://www.we-online.com/components/products/datasheet/691701700010B; Mount: Through Hole Reflow; Operating Temperature Min: -40degC; Operating Temperature Max: 130degC; Packaging: Tape and Reel; Application: Pluggable; Number of Pins: 10; Number of Rows: 1; Orientation: Vertical; Lead Pitch: 5mm
footprint 691701700010B
pins: 1, 2, 3, 4, 5, 6, 7, 8, 9, 10

## 691701700012B
designator P?  (value not drawn)
WR-TBL Series 7017B Open Vertical PCB Header, THR, pitch 5mm, 12p; Manufacturer: Wurth Elektronik; Insulator Material: LCP; Rated Current (cULus): 15A; Working Voltage (cULus): 300V (AC); Withstanding Voltage (cULus): 1600V (AC); Manufacturer Part Number: 691701700012B; Product Series: WR-TBL; ComponentLink1Description: Website Link; ComponentLink1URL: https://www.we-online.com; ComponentLink2Description: Datasheet Link; ComponentLink2URL: https://www.we-online.com/components/products/datasheet/691701700012B; Mount: Through Hole Reflow; Operating Temperature Min: -40degC; Operating Temperature Max: 130degC; Packaging: Tape and Reel; Application: Pluggable; Number of Pins: 12; Number of Rows: 1; Orientation: Vertical; Lead Pitch: 5mm
footprint 691701700012B
pins: 1, 2, 3, 4, 5, 6, 7, 8, 9, 10, 11, 12

## 691701700102B
designator P?  (value not drawn)
WR-TBL Series 7017B Closed Vertical PCB Header, THR, pitch 5mm, 02p; Manufacturer: Wurth Elektronik; Insulator Material: LCP; Rated Current (cULus): 15A; Working Voltage (cULus): 300V (AC); Withstanding Voltage (cULus): 1600V (AC); Manufacturer Part Number: 691701700102B; Product Series: WR-TBL; ComponentLink1Description: Website Link; ComponentLink1URL: https://www.we-online.com; ComponentLink2Description: Datasheet Link; ComponentLink2URL: https://www.we-online.com/components/products/datasheet/691701700102B; Mount: Through Hole Reflow; Operating Temperature Min: -40degC; Operating Temperature Max: 130degC; Packaging: Tape and Reel; Application: Pluggable; Number of Pins: 2; Number of Rows: 1; Orientation: Vertical; Lead Pitch: 5mm
footprint 691701700102B
pins: 1, 2

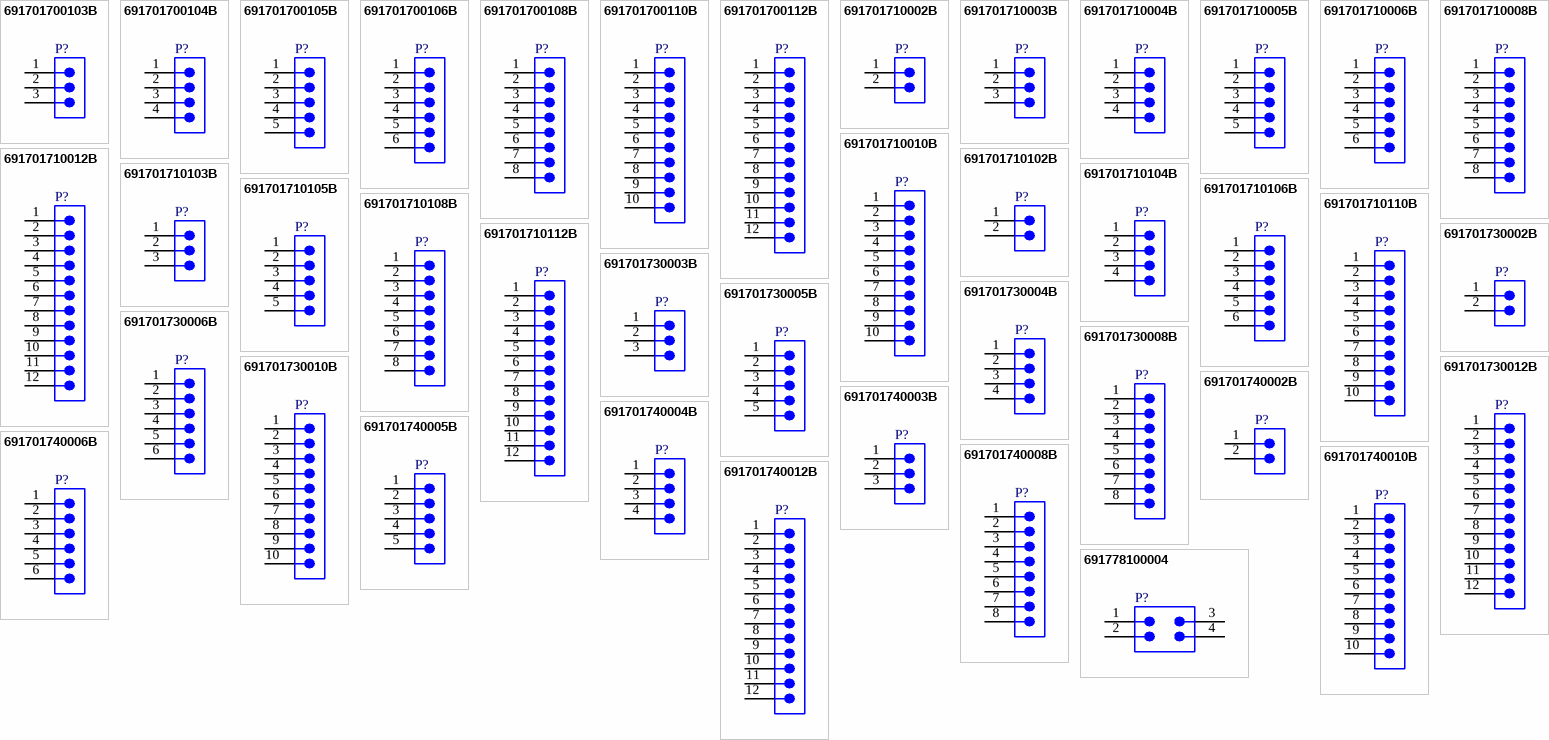
[diagram p20: symbols 691701700103B to 691778100004]

## 691701700103B
designator P?  (value not drawn)
WR-TBL Series 7017B Closed Vertical PCB Header, THR, pitch 5mm, 03p; Manufacturer: Wurth Elektronik; Insulator Material: LCP; Rated Current (cULus): 15A; Working Voltage (cULus): 300V (AC); Withstanding Voltage (cULus): 1600V (AC); Manufacturer Part Number: 691701700103B; Product Series: WR-TBL; ComponentLink1Description: Website Link; ComponentLink1URL: https://www.we-online.com; ComponentLink2Description: Datasheet Link; ComponentLink2URL: https://www.we-online.com/components/products/datasheet/691701700103B; Mount: Through Hole Reflow; Operating Temperature Min: -40degC; Operating Temperature Max: 130degC; Packaging: Tape and Reel; Application: Pluggable; Number of Pins: 3; Number of Rows: 1; Orientation: Vertical; Lead Pitch: 5mm
footprint 691701700103B
pins: 1, 2, 3

## 691701700104B
designator P?  (value not drawn)
WR-TBL Series 7017B Closed Vertical PCB Header, THR, pitch 5mm, 04p; Manufacturer: Wurth Elektronik; Insulator Material: LCP; Rated Current (cULus): 15A; Working Voltage (cULus): 300V (AC); Withstanding Voltage (cULus): 1600V (AC); Manufacturer Part Number: 691701700104B; Product Series: WR-TBL; ComponentLink1Description: Website Link; ComponentLink1URL: https://www.we-online.com; ComponentLink2Description: Datasheet Link; ComponentLink2URL: https://www.we-online.com/components/products/datasheet/691701700104B; Mount: Through Hole Reflow; Operating Temperature Min: -40degC; Operating Temperature Max: 130degC; Packaging: Tape and Reel; Application: Pluggable; Number of Pins: 4; Number of Rows: 1; Orientation: Vertical; Lead Pitch: 5mm
footprint 691701700104B
pins: 1, 2, 3, 4

## 691701700105B
designator P?  (value not drawn)
WR-TBL Series 7017B Closed Vertical PCB Header, THR, pitch 5mm, 05p; Manufacturer: Wurth Elektronik; Insulator Material: LCP; Rated Current (cULus): 15A; Working Voltage (cULus): 300V (AC); Withstanding Voltage (cULus): 1600V (AC); Manufacturer Part Number: 691701700105B; Product Series: WR-TBL; ComponentLink1Description: Website Link; ComponentLink1URL: https://www.we-online.com; ComponentLink2Description: Datasheet Link; ComponentLink2URL: https://www.we-online.com/components/products/datasheet/691701700105B; Mount: Through Hole Reflow; Operating Temperature Min: -40degC; Operating Temperature Max: 130degC; Packaging: Tape and Reel; Application: Pluggable; Number of Pins: 5; Number of Rows: 1; Orientation: Vertical; Lead Pitch: 5mm
footprint 691701700105B
pins: 1, 2, 3, 4, 5

## 691701700106B
designator P?  (value not drawn)
WR-TBL Series 7017B Closed Vertical PCB Header, THR, pitch 5mm, 06p; Manufacturer: Wurth Elektronik; Insulator Material: LCP; Rated Current (cULus): 15A; Working Voltage (cULus): 300V (AC); Withstanding Voltage (cULus): 1600V (AC); Manufacturer Part Number: 691701700106B; Product Series: WR-TBL; ComponentLink1Description: Website Link; ComponentLink1URL: https://www.we-online.com; ComponentLink2Description: Datasheet Link; ComponentLink2URL: https://www.we-online.com/components/products/datasheet/691701700106B; Mount: Through Hole Reflow; Operating Temperature Min: -40degC; Operating Temperature Max: 130degC; Packaging: Tape and Reel; Application: Pluggable; Number of Pins: 6; Number of Rows: 1; Orientation: Vertical; Lead Pitch: 5mm
footprint 691701700106B
pins: 1, 2, 3, 4, 5, 6

## 691701700108B
designator P?  (value not drawn)
WR-TBL Series 7017B Closed Vertical PCB Header, THR, pitch 5mm, 08p; Manufacturer: Wurth Elektronik; Insulator Material: LCP; Rated Current (cULus): 15A; Working Voltage (cULus): 300V (AC); Withstanding Voltage (cULus): 1600V (AC); Manufacturer Part Number: 691701700108B; Product Series: WR-TBL; ComponentLink1Description: Website Link; ComponentLink1URL: https://www.we-online.com; ComponentLink2Description: Datasheet Link; ComponentLink2URL: https://www.we-online.com/components/products/datasheet/691701700108B; Mount: Through Hole Reflow; Operating Temperature Min: -40degC; Operating Temperature Max: 130degC; Packaging: Tape and Reel; Application: Pluggable; Number of Pins: 8; Number of Rows: 1; Orientation: Vertical; Lead Pitch: 5mm
footprint 691701700108B
pins: 1, 2, 3, 4, 5, 6, 7, 8

## 691701700110B
designator P?  (value not drawn)
WR-TBL Series 7017B Closed Vertical PCB Header, THR, pitch 5mm, 10p; Manufacturer: Wurth Elektronik; Insulator Material: LCP; Rated Current (cULus): 15A; Working Voltage (cULus): 300V (AC); Withstanding Voltage (cULus): 1600V (AC); Manufacturer Part Number: 691701700110B; Product Series: WR-TBL; ComponentLink1Description: Website Link; ComponentLink1URL: https://www.we-online.com; ComponentLink2Description: Datasheet Link; ComponentLink2URL: https://www.we-online.com/components/products/datasheet/691701700110B; Mount: Through Hole Reflow; Operating Temperature Min: -40degC; Operating Temperature Max: 130degC; Packaging: Tape and Reel; Application: Pluggable; Number of Pins: 10; Number of Rows: 1; Orientation: Vertical; Lead Pitch: 5mm
footprint 691701700110B
pins: 1, 2, 3, 4, 5, 6, 7, 8, 9, 10

## 691701700112B
designator P?  (value not drawn)
WR-TBL Series 7017B Closed Vertical PCB Header, THR, pitch 5mm, 12p; Manufacturer: Wurth Elektronik; Insulator Material: LCP; Rated Current (cULus): 15A; Working Voltage (cULus): 300V (AC); Withstanding Voltage (cULus): 1600V (AC); Manufacturer Part Number: 691701700112B; Product Series: WR-TBL; ComponentLink1Description: Website Link; ComponentLink1URL: https://www.we-online.com; ComponentLink2Description: Datasheet Link; ComponentLink2URL: https://www.we-online.com/components/products/datasheet/691701700112B; Mount: Through Hole Reflow; Operating Temperature Min: -40degC; Operating Temperature Max: 130degC; Packaging: Tape and Reel; Application: Pluggable; Number of Pins: 12; Number of Rows: 1; Orientation: Vertical; Lead Pitch: 5mm
footprint 691701700112B
pins: 1, 2, 3, 4, 5, 6, 7, 8, 9, 10, 11, 12

## 691701710002B
designator P?  (value not drawn)
WR-TBL Series 7017B Open Horizontal PCB Header, THR, pitch 5mm, 02p; Manufacturer: Wurth Elektronik; Insulator Material: LCP; Rated Current (cULus): 15A; Working Voltage (cULus): 300V (AC); Withstanding Voltage (cULus): 1600V (AC); Manufacturer Part Number: 691701710002B; Product Series: WR-TBL; ComponentLink1Description: Website Link; ComponentLink1URL: https://www.we-online.com; ComponentLink2Description: Datasheet Link; ComponentLink2URL: https://www.we-online.com/components/products/datasheet/691701710002B; Mount: Through Hole Reflow; Operating Temperature Min: -40degC; Operating Temperature Max: 130degC; Packaging: Tape and Reel; Application: Pluggable; Number of Pins: 2; Number of Rows: 1; Orientation: Horizontal; Lead Pitch: 5mm
footprint 691701710002B
pins: 1, 2

## 691701710003B
designator P?  (value not drawn)
WR-TBL Series 7017B Open Horizontal PCB Header, THR, pitch 5mm, 03p; Manufacturer: Wurth Elektronik; Insulator Material: LCP; Rated Current (cULus): 15A; Working Voltage (cULus): 300V (AC); Withstanding Voltage (cULus): 1600V (AC); Manufacturer Part Number: 691701710003B; Product Series: WR-TBL; ComponentLink1Description: Website Link; ComponentLink1URL: https://www.we-online.com; ComponentLink2Description: Datasheet Link; ComponentLink2URL: https://www.we-online.com/components/products/datasheet/691701710003B; Mount: Through Hole Reflow; Operating Temperature Min: -40degC; Operating Temperature Max: 130degC; Packaging: Tape and Reel; Application: Pluggable; Number of Pins: 3; Number of Rows: 1; Orientation: Horizontal; Lead Pitch: 5mm
footprint 691701710003B
pins: 1, 2, 3

## 691701710004B
designator P?  (value not drawn)
WR-TBL Series 7017B Open Horizontal PCB Header, THR, pitch 5mm, 04p; Manufacturer: Wurth Elektronik; Insulator Material: LCP; Rated Current (cULus): 15A; Working Voltage (cULus): 300V (AC); Withstanding Voltage (cULus): 1600V (AC); Manufacturer Part Number: 691701710004B; Product Series: WR-TBL; ComponentLink1Description: Website Link; ComponentLink1URL: https://www.we-online.com; ComponentLink2Description: Datasheet Link; ComponentLink2URL: https://www.we-online.com/components/products/datasheet/691701710004B; Mount: Through Hole Reflow; Operating Temperature Min: -40degC; Operating Temperature Max: 130degC; Packaging: Tape and Reel; Application: Pluggable; Number of Pins: 4; Number of Rows: 1; Orientation: Horizontal; Lead Pitch: 5mm
footprint 691701710004B
pins: 1, 2, 3, 4